# Altium footprint library PCI_Express_M.2_Specification.PcbLib: 9 footprints
Each footprint in its own frame and in the unit in brackets; x right, y up, seen from the top. Pads: shape width x height; smd on the part's side, far side on the other; paste and mask are expansions set on the pad; w line width, h text height; cw(c..) or ccw(c..) is an arc to the next point about the centre after c.
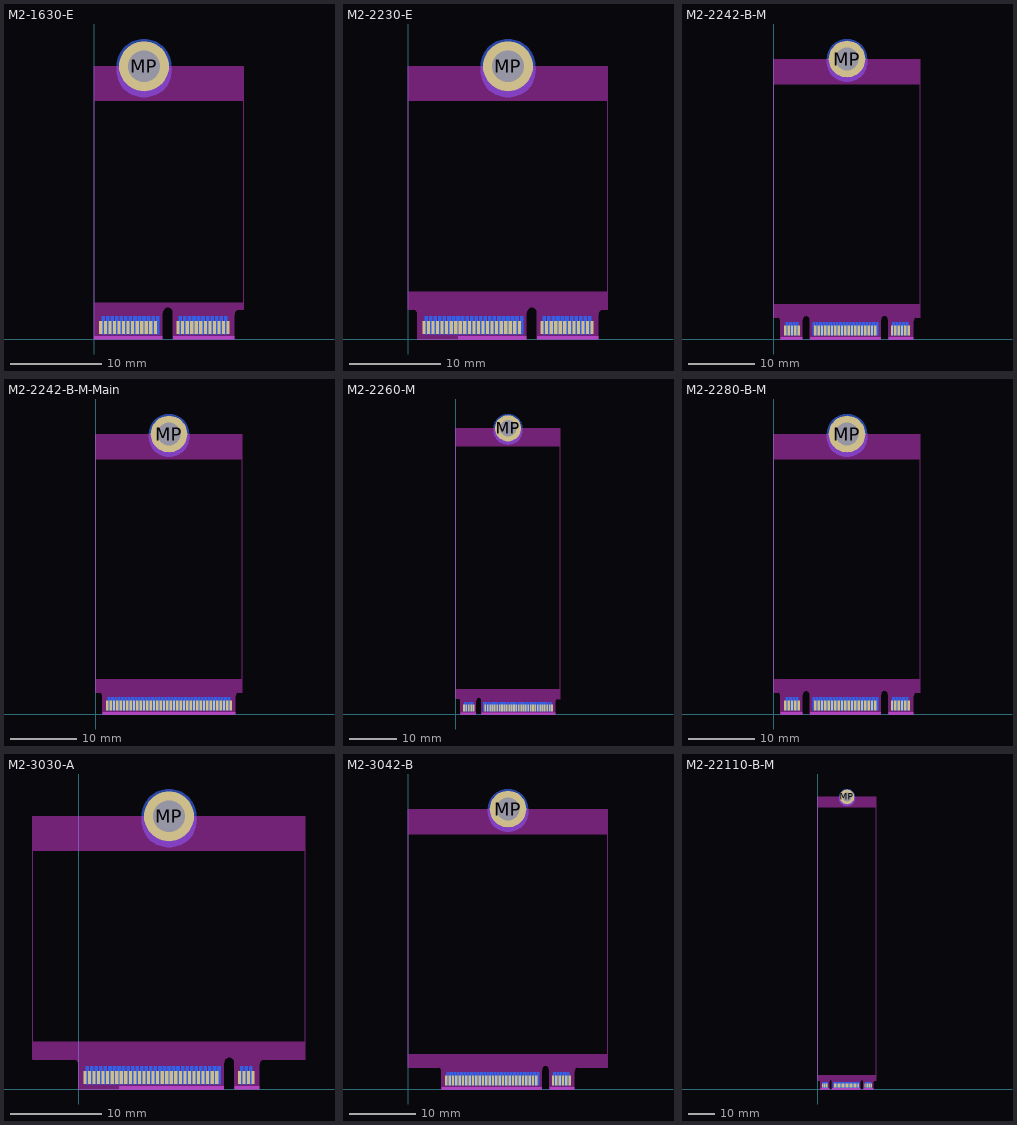
[diagram p0: the footprints below, top view; thin cyan lines are the x and y axes]

## M2-1630-E [mm] "M.2 1630 type E"
height 3
pads (50):
  rect 0.35x1.45 smd: 1(14.75,1.275) 3(14.25,1.275) 5(13.75,1.275) 7(13.25,1.275) 9(12.75,1.275) 11(12.25,1.275) 13(11.75,1.275) 15(11.25,1.275) 17(10.75,1.275) 19(10.25,1.275) 21(9.75,1.275) 23(9.25,1.275) 33(6.75,1.275) 35(6.25,1.275) 37(5.75,1.275) 39(5.25,1.275) 41(4.75,1.275) 43(4.25,1.275) 45(3.75,1.275) 47(3.25,1.275) 49(2.75,1.275) 51(2.25,1.275) 53(1.75,1.275) 55(1.25,1.275) 57(0.75,1.275)
  rect 0.35x1.95 smd far side: 2(14.5,1.525) 4(14,1.525) 6(13.5,1.525) 8(13,1.525) 10(12.5,1.525) 12(12,1.525) 14(11.5,1.525) 16(11,1.525) 18(10.5,1.525) 20(10,1.525) 22(9.5,1.525) 32(7,1.525) 34(6.5,1.525) 36(6,1.525) 38(5.5,1.525) 40(5,1.525) 42(4.5,1.525) 44(4,1.525) 46(3.5,1.525) 48(3,1.525) 50(2.5,1.525) 52(2,1.525) 54(1.5,1.525) 56(1,1.525)
  round 5.5 / inner round 5.5 / far side round 3.525 hole 3.5: MP(5.5,30)
Top Layer:
  text "E" at 9.052,3.025 h0.35
Bottom Layer:
  region: 7.788,27.548 7.714,27.473 7.554,27.333 7.386,27.204 7.21,27.087 7.026,26.981 6.836,26.887 6.641,26.806 6.44,26.738 6.235,26.683 6.027,26.642 5.817,26.614 5.606,26.6 5.5,26.6 5.395,26.6 5.185,26.615 4.977,26.643 4.771,26.685 4.568,26.74 4.369,26.808 4.175,26.889 3.987,26.983 3.805,27.088 3.631,27.206 3.464,27.334 3.307,27.473 3.233,27.548 3.163,27.633 3.036,27.811 2.921,27.997 2.818,28.191 2.728,28.39 2.651,28.595 2.588,28.805 2.538,29.019 2.503,29.235 2.482,29.453 2.475,29.672 2.483,29.891 2.494,30 2.494,30.118 2.512,30.354 2.549,30.587 2.604,30.817 2.677,31.041 2.768,31.26 2.875,31.47 2.998,31.671 3.137,31.863 3.291,32.042 3.458,32.209 3.637,32.363 3.829,32.502 4.03,32.625 4.24,32.732 4.459,32.823 4.683,32.896 4.913,32.951 5.146,32.988 5.382,33.006 5.5,33.006 5.618,33.006 5.854,32.988 6.087,32.951 6.317,32.896 6.541,32.823 6.76,32.732 6.97,32.625 7.171,32.501 7.363,32.363 7.542,32.209 7.709,32.042 7.863,31.863 8.001,31.671 8.125,31.47 8.232,31.26 8.323,31.041 8.396,30.817 8.451,30.587 8.488,30.354 8.506,30.118 8.506,30 8.518,29.891 8.527,29.673 8.522,29.454 8.503,29.237 8.469,29.021 8.422,28.807 8.361,28.598 8.286,28.392 8.197,28.192 8.096,27.999 7.983,27.812 7.857,27.633
Top Solder:
  region: 8.725,0 8.725,2 15.425,2 15.425,0
  region: 0,0 0,2 7.525,2 7.525,0
  text "E" at 9.052,3.025 h0.35
Bottom Solder:
  region: 8.725,0 8.725,2.5 15.425,2.5 15.425,0
  region: 0,0 0,2.5 7.525,2.5 7.525,0
Keep-Out Layer:
  region: 16.5,4 0,4 0,0 7.525,0 7.525,2.9 7.537,3.017 7.626,3.233 7.792,3.399 8.008,3.488 8.125,3.5 8.242,3.488 8.458,3.399 8.624,3.233 8.713,3.017 8.725,2.9 8.725,0 15.425,0 15.425,2.75 15.435,2.848 15.509,3.028 15.647,3.166 15.827,3.24 15.925,3.25 16.5,3.25
  region: 0,30 0,26.2 16.5,26.2 16.5,30
  lines w0.1: 0,0 7.525,0 7.525,2.9 cw(c8.125,2.9) 8.725,2.9 8.725,0 15.425,0 15.425,2.75 cw(c15.925,2.75) 15.925,3.25 16.5,3.25 16.5,30 0,30 0,0
Mechanical 1:
  text "AREA RESERVED FOR RF RECEPTACLES OR COMPONENTS WHEN NO RF RECEPTACLES USED" at 8.753,26.615 h0.35
  text "Bottom Side Component Zone Limit" at 0.147,2.526 h0.35
Card Edge Bevel:
  region: 0,0.3 0,0 7.525,0 7.525,0.3
  region: 8.725,0.3 8.725,0 15.425,0 15.425,0.3

## M2-2230-E [mm] "M.2 2230 type E"
height 3
pads (68):
  rect 0.35x1.45 smd: 1(20.25,1.275) 3(19.75,1.275) 5(19.25,1.275) 7(18.75,1.275) 9(18.25,1.275) 11(17.75,1.275) 13(17.25,1.275) 15(16.75,1.275) 17(16.25,1.275) 19(15.75,1.275) 21(15.25,1.275) 23(14.75,1.275) 33(12.25,1.275) 35(11.75,1.275) 37(11.25,1.275) 39(10.75,1.275) 41(10.25,1.275) 43(9.75,1.275) 45(9.25,1.275) 47(8.75,1.275) 49(8.25,1.275) 51(7.75,1.275) 53(7.25,1.275) 55(6.75,1.275) 57(6.25,1.275) 59(5.75,1.275) 61(5.25,1.275) 63(4.75,1.275) 65(4.25,1.275) 67(3.75,1.275) 69(3.25,1.275) 71(2.75,1.275) 73(2.25,1.275) 75(1.75,1.275)
  rect 0.35x1.95 smd far side: 2(20,1.525) 4(19.5,1.525) 6(19,1.525) 8(18.5,1.525) 10(18,1.525) 12(17.5,1.525) 14(17,1.525) 16(16.5,1.525) 18(16,1.525) 20(15.5,1.525) 22(15,1.525) 32(12.5,1.525) 34(12,1.525) 36(11.5,1.525) 38(11,1.525) 40(10.5,1.525) 42(10,1.525) 44(9.5,1.525) 46(9,1.525) 48(8.5,1.525) 50(8,1.525) 52(7.5,1.525) 54(7,1.525) 56(6.5,1.525) 58(6,1.525) 60(5.5,1.525) 62(5,1.525) 64(4.5,1.525) 66(4,1.525) 68(3.5,1.525) 70(3,1.525) 72(2.5,1.525) 74(2,1.525)
  round 5.5 / inner round 5.5 / far side round 3.525 hole 3.5: MP(11,30)
Top Layer:
  text "E" at 14.552,3.025 h0.35
Bottom Layer:
  region: 13.288,27.548 13.214,27.473 13.054,27.333 12.886,27.204 12.71,27.087 12.526,26.981 12.336,26.887 12.141,26.806 11.94,26.738 11.735,26.683 11.527,26.642 11.317,26.614 11.106,26.6 11,26.6 10.895,26.6 10.685,26.615 10.477,26.643 10.271,26.685 10.068,26.74 9.869,26.808 9.675,26.889 9.487,26.983 9.305,27.088 9.131,27.206 8.964,27.334 8.807,27.473 8.733,27.548 8.663,27.633 8.536,27.811 8.421,27.997 8.318,28.191 8.228,28.39 8.151,28.595 8.088,28.805 8.038,29.019 8.003,29.235 7.982,29.453 7.975,29.672 7.983,29.891 7.994,30 7.994,30.118 8.012,30.354 8.049,30.587 8.104,30.817 8.177,31.041 8.268,31.26 8.375,31.47 8.498,31.671 8.637,31.863 8.791,32.042 8.958,32.209 9.137,32.363 9.329,32.502 9.53,32.625 9.74,32.732 9.959,32.823 10.183,32.896 10.413,32.951 10.646,32.988 10.882,33.006 11,33.006 11.118,33.006 11.354,32.988 11.587,32.951 11.817,32.896 12.041,32.823 12.26,32.732 12.47,32.625 12.671,32.501 12.863,32.363 13.042,32.209 13.209,32.042 13.363,31.863 13.501,31.671 13.625,31.47 13.732,31.26 13.823,31.041 13.896,30.817 13.951,30.587 13.988,30.354 14.006,30.118 14.006,30 14.018,29.891 14.027,29.673 14.022,29.454 14.003,29.237 13.969,29.021 13.922,28.807 13.861,28.598 13.786,28.392 13.697,28.192 13.596,27.999 13.483,27.812 13.357,27.633
Top Solder:
  region: 14.225,0 14.225,2 20.925,2 20.925,0
  region: 1.064,0 1.064,2 13.025,2 13.025,0
  text "E" at 14.552,3.025 h0.35
Bottom Solder:
  region: 14.225,0 14.225,2.5 20.925,2.5 20.925,0
  region: 1.064,0 1.064,2.5 13.025,2.5 13.025,0
Keep-Out Layer:
  region: 22,5.2 0,5.2 0,3.263 0.593,3.263 0.64,3.259 0.732,3.239 0.82,3.204 0.9,3.154 0.936,3.124 0.968,3.089 1.02,3.009 1.056,2.921 1.073,2.828 1.075,2.781 1.075,0 13.025,0 13.025,2.9 13.037,3.017 13.126,3.233 13.292,3.399 13.508,3.488 13.625,3.5 13.742,3.488 13.958,3.399 14.124,3.233 14.213,3.017 14.225,2.9 14.225,0 20.925,0 20.925,2.75 20.935,2.848 21.009,3.028 21.147,3.166 21.327,3.24 21.425,3.25 22,3.25
  region: 0,30 0,26.2 22,26.2 22,30
  lines w0.1: 0,3.263 0.593,3.263 cw(c0.593,2.781) 1.075,2.781 1.075,0 13.025,0 13.025,2.9 cw(c13.625,2.9) 14.225,2.9 14.225,0 20.925,0 20.925,2.75 cw(c21.425,2.75) 21.425,3.25 22,3.25 22,30 16.5,30 0,30 0,3.263
Mechanical 1:
  text "AREA RESERVED FOR RF RECEPTACLES OR COMPONENTS WHEN NO RF RECEPTACLES USED" at 14.253,26.615 h0.35
  text "Bottom Side Component Zone Limit" at 1.853,3.27 h0.35
Card Edge Bevel:
  region: 5.5,0.3 5.5,0 13.025,0 13.025,0.3
  region: 14.225,0.3 14.225,0 20.925,0 20.925,0.3

## M2-2242-B-M [mm] "M.2 2242 type B M"
height 3
pads (60):
  rect 0.35x1.45 smd: 1(20.25,1.275) 3(19.75,1.275) 5(19.25,1.275) 7(18.75,1.275) 9(18.25,1.275) 11(17.75,1.275) 21(15.25,1.275) 23(14.75,1.275) 25(14.25,1.275) 27(13.75,1.275) 29(13.25,1.275) 31(12.75,1.275) 33(12.25,1.275) 35(11.75,1.275) 37(11.25,1.275) 39(10.75,1.275) 41(10.25,1.275) 43(9.75,1.275) 45(9.25,1.275) 47(8.75,1.275) 49(8.25,1.275) 51(7.75,1.275) 53(7.25,1.275) 55(6.75,1.275) 57(6.25,1.275) 67(3.75,1.275) 69(3.25,1.275) 71(2.75,1.275) 73(2.25,1.275) 75(1.75,1.275)
  rect 0.35x1.95 smd far side: 2(20,1.525) 4(19.5,1.525) 6(19,1.525) 8(18.5,1.525) 10(18,1.525) 20(15.5,1.525) 22(15,1.525) 24(14.5,1.525) 26(14,1.525) 28(13.5,1.525) 30(13,1.525) 32(12.5,1.525) 34(12,1.525) 36(11.5,1.525) 38(11,1.525) 40(10.5,1.525) 42(10,1.525) 44(9.5,1.525) 46(9,1.525) 48(8.5,1.525) 50(8,1.525) 52(7.5,1.525) 54(7,1.525) 56(6.5,1.525) 58(6,1.525) 68(3.5,1.525) 70(3,1.525) 72(2.5,1.525) 74(2,1.525)
  round 5.5 / inner round 5.5 / far side round 3.525 hole 3.5: MP(11,41.997)
Top Layer:
  text "B" at 17.602,3.025 h0.35
  text "M" at 5.952,3.025 h0.35
Bottom Layer:
  region: 13.288,39.545 13.214,39.47 13.054,39.33 12.886,39.201 12.71,39.083 12.526,38.977 12.336,38.884 12.141,38.803 11.94,38.735 11.735,38.68 11.527,38.638 11.317,38.611 11.106,38.597 11,38.597 10.895,38.597 10.685,38.612 10.477,38.64 10.271,38.681 10.068,38.737 9.869,38.805 9.675,38.886 9.487,38.979 9.305,39.085 9.131,39.203 8.964,39.331 8.807,39.47 8.733,39.545 8.663,39.63 8.536,39.808 8.421,39.994 8.318,40.187 8.228,40.387 8.151,40.592 8.088,40.802 8.038,41.015 8.003,41.232 7.982,41.45 7.975,41.669 7.983,41.888 7.994,41.997 7.994,42.115 8.012,42.35 8.049,42.584 8.104,42.814 8.177,43.038 8.268,43.256 8.375,43.467 8.498,43.668 8.637,43.859 8.791,44.039 8.958,44.206 9.137,44.36 9.329,44.498 9.53,44.622 9.74,44.729 9.959,44.819 10.183,44.892 10.413,44.948 10.646,44.985 10.882,45.003 11,45.003 11.118,45.003 11.354,44.985 11.587,44.948 11.817,44.892 12.041,44.819 12.26,44.729 12.47,44.622 12.671,44.498 12.863,44.36 13.042,44.206 13.209,44.039 13.363,43.859 13.501,43.668 13.625,43.467 13.732,43.256 13.823,43.038 13.896,42.814 13.951,42.584 13.988,42.35 14.006,42.115 14.006,41.997 14.018,41.888 14.027,41.67 14.022,41.451 14.003,41.234 13.969,41.018 13.922,40.804 13.861,40.595 13.786,40.389 13.697,40.189 13.596,39.996 13.483,39.809 13.357,39.63
Top Solder:
  region: 5.476,0 5.476,2 16.026,2 16.026,0
  region: 1.064,0 1.064,2 4.276,2 4.276,0
  region: 17.226,0 17.226,2 20.925,2 20.925,0
  text "M" at 5.952,3.025 h0.35
  text "B" at 17.602,3.025 h0.35
Bottom Solder:
  region: 5.476,0 5.476,2.5 16.026,2.5 16.026,0
  region: 1.064,0 1.064,2.5 4.276,2.5 4.276,0
  region: 17.226,0 17.226,2.5 20.925,2.5 20.925,0
Keep-Out Layer:
  region: 0,42 0,38.2 22,38.2 22,42
  region: 22,5.2 22,3.25 21.425,3.25 21.327,3.24 21.147,3.166 21.009,3.028 20.935,2.848 20.925,2.75 20.925,0 17.226,0 17.226,2.9 17.215,3.017 17.125,3.233 16.96,3.399 16.743,3.488 16.626,3.5 16.509,3.488 16.293,3.399 16.127,3.233 16.038,3.017 16.026,2.9 16.026,0 5.476,0 5.476,2.9 5.465,3.017 5.375,3.233 5.21,3.399 4.993,3.488 4.876,3.5 4.759,3.488 4.543,3.399 4.377,3.233 4.288,3.017 4.276,2.9 4.276,0 1.075,0 1.075,2.781 1.066,2.875 0.994,3.049 0.861,3.182 0.687,3.254 0.593,3.263 0,3.263 0,5.2
  lines w0.1: 20.925,0 20.925,0 ; 20.925,0 17.226,0 17.226,2.9 ccw(c16.626,2.9) 16.026,2.9 16.026,0 5.476,0 5.476,2.9 ccw(c4.876,2.9) 4.276,2.9 4.276,0 1.075,0 1.075,2.781 ccw(c0.593,2.781) 0.593,3.263 0,3.263 0,42 22,42 22,3.25 21.425,3.25 ccw(c21.425,2.75) 20.925,2.75 20.925,0
Mechanical 1:
  text "Bottom Side Component Zone Limit" at 1.849,3.517 h0.35
  text "AREA RESERVED FOR RF RECEPTACLES OR COMPONENTS WHEN NO RF RECEPTACLES USED" at 14.253,38.515 h0.35
Card Edge Bevel:
  region: 17.226,0.3 17.226,0 20.925,0 20.925,0.3
  region: 5.476,0.3 5.476,0 16.026,0 16.026,0.3
  region: 1.075,0.3 1.075,0 4.276,0 4.276,0.3

## M2-2242-B-M-Main [mm] "M.2 2242 type B M"
height 3
pads (76):
  rect 0.35x1.45 smd: 1(20.25,1.275) 3(19.75,1.275) 5(19.25,1.275) 7(18.75,1.275) 9(18.25,1.275) 11(17.75,1.275) 13(17.25,1.275) 15(16.75,1.275) 17(16.25,1.275) 19(15.75,1.275) 21(15.25,1.275) 23(14.75,1.275) 25(14.25,1.275) 27(13.75,1.275) 29(13.25,1.275) 31(12.75,1.275) 33(12.25,1.275) 35(11.75,1.275) 37(11.25,1.275) 39(10.75,1.275) 41(10.25,1.275) 43(9.75,1.275) 45(9.25,1.275) 47(8.75,1.275) 49(8.25,1.275) 51(7.75,1.275) 53(7.25,1.275) 55(6.75,1.275) 57(6.25,1.275) 59(5.75,1.275) 61(5.25,1.275) 63(4.75,1.275) 65(4.25,1.275) 67(3.75,1.275) 69(3.25,1.275) 71(2.75,1.275) 73(2.25,1.275) 75(1.75,1.275)
  rect 0.35x1.95 smd far side: 2(20,1.525) 4(19.5,1.525) 6(19,1.525) 8(18.5,1.525) 10(18,1.525) 12(17.5,1.525) 14(17,1.525) 16(16.5,1.525) 18(16,1.525) 20(15.5,1.525) 22(15,1.525) 24(14.5,1.525) 26(14,1.525) 28(13.5,1.525) 30(13,1.525) 32(12.5,1.525) 34(12,1.525) 36(11.5,1.525) 38(11,1.525) 40(10.5,1.525) 42(10,1.525) 44(9.5,1.525) 46(9,1.525) 48(8.5,1.525) 50(8,1.525) 52(7.5,1.525) 54(7,1.525) 56(6.5,1.525) 58(6,1.525) 60(5.5,1.525) 62(5,1.525) 64(4.5,1.525) 66(4,1.525) 68(3.5,1.525) 70(3,1.525) 72(2.5,1.525) 74(2,1.525)
  round 5.5 / inner round 5.5 / far side round 3.525 hole 3.5: MP(11,41.997)
Top Layer:
  text "Edit_Key_Number" at 16.19,3.983 h0.35
Bottom Layer:
  region: 13.288,39.545 13.214,39.47 13.054,39.33 12.886,39.201 12.71,39.083 12.526,38.977 12.336,38.884 12.141,38.803 11.94,38.735 11.735,38.68 11.527,38.638 11.317,38.611 11.106,38.597 11,38.597 10.895,38.597 10.685,38.612 10.477,38.64 10.271,38.681 10.068,38.737 9.869,38.805 9.675,38.886 9.487,38.979 9.305,39.085 9.131,39.203 8.964,39.331 8.807,39.47 8.733,39.545 8.663,39.63 8.536,39.808 8.421,39.994 8.318,40.187 8.228,40.387 8.151,40.592 8.088,40.802 8.038,41.015 8.003,41.232 7.982,41.45 7.975,41.669 7.983,41.888 7.994,41.997 7.994,42.115 8.012,42.35 8.049,42.584 8.104,42.814 8.177,43.038 8.268,43.256 8.375,43.467 8.498,43.668 8.637,43.859 8.791,44.039 8.958,44.206 9.137,44.36 9.329,44.498 9.53,44.622 9.74,44.729 9.959,44.819 10.183,44.892 10.413,44.948 10.646,44.985 10.882,45.003 11,45.003 11.118,45.003 11.354,44.985 11.587,44.948 11.817,44.892 12.041,44.819 12.26,44.729 12.47,44.622 12.671,44.498 12.863,44.36 13.042,44.206 13.209,44.039 13.363,43.859 13.501,43.668 13.625,43.467 13.732,43.256 13.823,43.038 13.896,42.814 13.951,42.584 13.988,42.35 14.006,42.115 14.006,41.997 14.018,41.888 14.027,41.67 14.022,41.451 14.003,41.234 13.969,41.018 13.922,40.804 13.861,40.595 13.786,40.389 13.697,40.189 13.596,39.996 13.483,39.809 13.357,39.63
Top Solder:
  region: 1.064,0 1.064,2 20.925,2 20.925,0
  text "Edit_Key_Number" at 16.19,3.983 h0.35
Bottom Solder:
  region: 1.064,0 1.064,2.5 20.925,2.5 20.925,0
Keep-Out Layer:
  region: 22,5.2 22,3.25 21.425,3.25 21.327,3.24 21.147,3.166 21.009,3.028 20.935,2.848 20.925,2.75 20.925,0 1.075,0 1.075,2.781 1.066,2.875 0.994,3.049 0.861,3.182 0.687,3.254 0.593,3.263 0,3.263 0,5.2
  region: 0,42 0,38.2 22,38.2 22,42
  lines w0.1: 20.925,0 1.075,0 1.075,2.781 ccw(c0.593,2.781) 0.593,3.263 0,3.263 0,42 22,42 22,3.25 21.425,3.25 ccw(c21.425,2.75) 20.925,2.75 20.925,0 ; 20.925,0 20.925,0
Mechanical 1:
  text "AREA RESERVED FOR RF RECEPTACLES OR COMPONENTS WHEN NO RF RECEPTACLES USED" at 14.253,38.515 h0.35
  text "Bottom Side Component Zone Limit" at 7.353,3.517 h0.35
Card Edge Bevel:
  region: 1.075,0.3 1.075,0 20.925,0 20.925,0.3

## M2-2260-M [mm] "M.2 2260 type M"
height 3
pads (68):
  rect 0.35x1.45 smd: 1(20.25,1.275) 3(19.75,1.275) 5(19.25,1.275) 7(18.75,1.275) 9(18.25,1.275) 11(17.75,1.275) 13(17.25,1.275) 15(16.75,1.275) 17(16.25,1.275) 19(15.75,1.275) 21(15.25,1.275) 23(14.75,1.275) 25(14.25,1.275) 27(13.75,1.275) 29(13.25,1.275) 31(12.75,1.275) 33(12.25,1.275) 35(11.75,1.275) 37(11.25,1.275) 39(10.75,1.275) 41(10.25,1.275) 43(9.75,1.275) 45(9.25,1.275) 47(8.75,1.275) 49(8.25,1.275) 51(7.75,1.275) 53(7.25,1.275) 55(6.75,1.275) 57(6.25,1.275) 67(3.75,1.275) 69(3.25,1.275) 71(2.75,1.275) 73(2.25,1.275) 75(1.75,1.275)
  rect 0.35x1.95 smd far side: 2(20,1.525) 4(19.5,1.525) 6(19,1.525) 8(18.5,1.525) 10(18,1.525) 12(17.5,1.525) 14(17,1.525) 16(16.5,1.525) 18(16,1.525) 20(15.5,1.525) 22(15,1.525) 24(14.5,1.525) 26(14,1.525) 28(13.5,1.525) 30(13,1.525) 32(12.5,1.525) 34(12,1.525) 36(11.5,1.525) 38(11,1.525) 40(10.5,1.525) 42(10,1.525) 44(9.5,1.525) 46(9,1.525) 48(8.5,1.525) 50(8,1.525) 52(7.5,1.525) 54(7,1.525) 56(6.5,1.525) 58(6,1.525) 68(3.5,1.525) 70(3,1.525) 72(2.5,1.525) 74(2,1.525)
  round 5.5 / inner round 5.5 / far side round 3.525 hole 3.5: MP(11,60)
Top Layer:
  text "M" at 5.952,3.025 h0.35
Bottom Layer:
  region: 13.288,57.548 13.214,57.473 13.054,57.333 12.886,57.204 12.71,57.087 12.526,56.981 12.336,56.887 12.141,56.806 11.94,56.738 11.735,56.683 11.527,56.642 11.317,56.614 11.106,56.6 11,56.6 10.895,56.6 10.685,56.615 10.477,56.643 10.271,56.685 10.068,56.74 9.869,56.808 9.675,56.889 9.487,56.983 9.305,57.088 9.131,57.206 8.964,57.334 8.807,57.473 8.733,57.548 8.663,57.633 8.536,57.811 8.421,57.997 8.318,58.191 8.228,58.39 8.151,58.595 8.088,58.805 8.038,59.019 8.003,59.235 7.982,59.453 7.975,59.672 7.983,59.891 7.994,60 7.994,60.118 8.012,60.354 8.049,60.587 8.104,60.817 8.177,61.041 8.268,61.26 8.375,61.47 8.498,61.671 8.637,61.863 8.791,62.042 8.958,62.209 9.137,62.363 9.329,62.502 9.53,62.625 9.74,62.732 9.959,62.823 10.183,62.896 10.413,62.951 10.646,62.988 10.882,63.006 11,63.006 11.118,63.006 11.354,62.988 11.587,62.951 11.817,62.896 12.041,62.823 12.26,62.732 12.47,62.625 12.671,62.501 12.863,62.363 13.042,62.209 13.209,62.042 13.363,61.863 13.501,61.671 13.625,61.47 13.732,61.26 13.823,61.041 13.896,60.817 13.951,60.587 13.988,60.354 14.006,60.118 14.006,60 14.018,59.891 14.027,59.673 14.022,59.454 14.003,59.237 13.969,59.021 13.922,58.807 13.861,58.598 13.786,58.392 13.697,58.192 13.596,57.999 13.483,57.812 13.357,57.633
Top Solder:
  region: 1.064,0 1.064,2 4.276,2 4.276,0
  region: 5.476,0 5.476,2 20.925,2 20.925,0
  text "M" at 5.952,3.025 h0.35
Bottom Solder:
  region: 1.064,0 1.064,2.5 4.276,2.5 4.276,0
  region: 5.476,0 5.476,2.5 20.925,2.5 20.925,0
Keep-Out Layer:
  region: 22,5.2 22,3.25 21.425,3.25 21.327,3.24 21.147,3.166 21.009,3.028 20.935,2.848 20.925,2.75 20.925,0 5.476,0 5.476,2.9 5.465,3.017 5.375,3.233 5.21,3.399 4.993,3.488 4.876,3.5 4.759,3.488 4.543,3.399 4.377,3.233 4.288,3.017 4.276,2.9 4.276,0 1.075,0 1.075,2.781 1.066,2.875 0.994,3.049 0.861,3.182 0.687,3.254 0.593,3.263 0,3.263 0,5.2
  region: 0,60 0,56.2 22,56.2 22,60
  lines w0.1: 20.925,0 20.925,2.75 cw(c21.425,2.75) 21.425,3.25 22,3.25 22,60 0,60 0,3.263 0.593,3.263 cw(c0.593,2.781) 1.075,2.781 1.075,0 4.276,0 4.276,2.9 cw(c4.876,2.9) 5.476,2.9 5.476,0 20.925,0 ; 20.925,0 20.925,0
Mechanical 1:
  text "AREA RESERVED FOR RF RECEPTACLES OR COMPONENTS WHEN NO RF RECEPTACLES USED" at 14.253,56.515 h0.35
  text "Bottom Side Component Zone Limit" at 8.753,3.17 h0.35
Card Edge Bevel:
  region: 1.075,0.3 1.075,0 4.276,0 4.276,0.3
  region: 5.476,0.3 5.476,0 20.925,0 20.925,0.3

## M2-2280-B-M [mm] "M.2 2280 type B M"
height 3
pads (60):
  rect 0.35x1.45 smd: 1(20.25,1.275) 3(19.75,1.275) 5(19.25,1.275) 7(18.75,1.275) 9(18.25,1.275) 11(17.75,1.275) 21(15.25,1.275) 23(14.75,1.275) 25(14.25,1.275) 27(13.75,1.275) 29(13.25,1.275) 31(12.75,1.275) 33(12.25,1.275) 35(11.75,1.275) 37(11.25,1.275) 39(10.75,1.275) 41(10.25,1.275) 43(9.75,1.275) 45(9.25,1.275) 47(8.75,1.275) 49(8.25,1.275) 51(7.75,1.275) 53(7.25,1.275) 55(6.75,1.275) 57(6.25,1.275) 67(3.75,1.275) 69(3.25,1.275) 71(2.75,1.275) 73(2.25,1.275) 75(1.75,1.275)
  rect 0.35x1.95 smd far side: 2(20,1.525) 4(19.5,1.525) 6(19,1.525) 8(18.5,1.525) 10(18,1.525) 20(15.5,1.525) 22(15,1.525) 24(14.5,1.525) 26(14,1.525) 28(13.5,1.525) 30(13,1.525) 32(12.5,1.525) 34(12,1.525) 36(11.5,1.525) 38(11,1.525) 40(10.5,1.525) 42(10,1.525) 44(9.5,1.525) 46(9,1.525) 48(8.5,1.525) 50(8,1.525) 52(7.5,1.525) 54(7,1.525) 56(6.5,1.525) 58(6,1.525) 68(3.5,1.525) 70(3,1.525) 72(2.5,1.525) 74(2,1.525)
  round 5.5 / inner round 5.5 / far side round 3.525 hole 3.5: MP(11,41.997)
Top Layer:
  text "M" at 5.952,3.025 h0.35
  text "B" at 17.602,3.025 h0.35
Bottom Layer:
  region: 13.288,39.545 13.214,39.47 13.054,39.33 12.886,39.201 12.71,39.083 12.526,38.977 12.336,38.884 12.141,38.803 11.94,38.735 11.735,38.68 11.527,38.638 11.317,38.611 11.106,38.597 11,38.597 10.895,38.597 10.685,38.612 10.477,38.64 10.271,38.681 10.068,38.737 9.869,38.805 9.675,38.886 9.487,38.979 9.305,39.085 9.131,39.203 8.964,39.331 8.807,39.47 8.733,39.545 8.663,39.63 8.536,39.808 8.421,39.994 8.318,40.187 8.228,40.387 8.151,40.592 8.088,40.802 8.038,41.015 8.003,41.232 7.982,41.45 7.975,41.669 7.983,41.888 7.994,41.997 7.994,42.115 8.012,42.35 8.049,42.584 8.104,42.814 8.177,43.038 8.268,43.256 8.375,43.467 8.498,43.668 8.637,43.859 8.791,44.039 8.958,44.206 9.137,44.36 9.329,44.498 9.53,44.622 9.74,44.729 9.959,44.819 10.183,44.892 10.413,44.948 10.646,44.985 10.882,45.003 11,45.003 11.118,45.003 11.354,44.985 11.587,44.948 11.817,44.892 12.041,44.819 12.26,44.729 12.47,44.622 12.671,44.498 12.863,44.36 13.042,44.206 13.209,44.039 13.363,43.859 13.501,43.668 13.625,43.467 13.732,43.256 13.823,43.038 13.896,42.814 13.951,42.584 13.988,42.35 14.006,42.115 14.006,41.997 14.018,41.888 14.027,41.67 14.022,41.451 14.003,41.234 13.969,41.018 13.922,40.804 13.861,40.595 13.786,40.389 13.697,40.189 13.596,39.996 13.483,39.809 13.357,39.63
Top Solder:
  region: 17.226,0 17.226,2 20.925,2 20.925,0
  region: 1.064,0 1.064,2 4.276,2 4.276,0
  region: 5.476,0 5.476,2 16.026,2 16.026,0
  text "B" at 17.602,3.025 h0.35
  text "M" at 5.952,3.025 h0.35
Bottom Solder:
  region: 17.226,0 17.226,2.5 20.925,2.5 20.925,0
  region: 1.064,0 1.064,2.5 4.276,2.5 4.276,0
  region: 5.476,0 5.476,2.5 16.026,2.5 16.026,0
Keep-Out Layer:
  region: 22,5.2 22,3.25 21.425,3.25 21.327,3.24 21.147,3.166 21.009,3.028 20.935,2.848 20.925,2.75 20.925,0 17.226,0 17.226,2.9 17.215,3.017 17.125,3.233 16.96,3.399 16.743,3.488 16.626,3.5 16.509,3.488 16.293,3.399 16.127,3.233 16.038,3.017 16.026,2.9 16.026,0 5.476,0 5.476,2.9 5.465,3.017 5.375,3.233 5.21,3.399 4.993,3.488 4.876,3.5 4.759,3.488 4.543,3.399 4.377,3.233 4.288,3.017 4.276,2.9 4.276,0 1.075,0 1.075,2.781 1.066,2.875 0.994,3.049 0.861,3.182 0.687,3.254 0.593,3.263 0,3.263 0,5.2
  region: 0,42 0,38.2 22,38.2 22,42
  lines w0.1: 20.925,0 20.925,2.75 cw(c21.425,2.75) 21.425,3.25 22,3.25 22,42 0,42 0,3.263 0.593,3.263 cw(c0.593,2.781) 1.075,2.781 1.075,0 4.276,0 4.276,2.9 cw(c4.876,2.9) 5.476,2.9 5.476,0 16.026,0 16.026,2.9 cw(c16.626,2.9) 17.226,2.9 17.226,0 20.925,0 ; 20.925,0 20.925,0
Mechanical 1:
  text "AREA RESERVED FOR RF RECEPTACLES OR COMPONENTS WHEN NO RF RECEPTACLES USED" at 14.253,38.515 h0.35
  text "Bottom Side Component Zone Limit" at 7.353,3.517 h0.35
Card Edge Bevel:
  region: 1.075,0.3 1.075,0 4.276,0 4.276,0.3
  region: 5.476,0.3 5.476,0 16.026,0 16.026,0.3
  region: 17.226,0.3 17.226,0 20.925,0 20.925,0.3

## M2-3030-A [mm] "M.2 3030 type A"
height 3
pads (68):
  rect 0.35x1.45 smd: 1(19.175,1.275) 3(18.675,1.275) 5(18.175,1.275) 7(17.675,1.275) 17(15.175,1.275) 19(14.675,1.275) 21(14.175,1.275) 23(13.675,1.275) 25(13.175,1.275) 27(12.675,1.275) 29(12.175,1.275) 31(11.675,1.275) 33(11.175,1.275) 35(10.675,1.275) 37(10.175,1.275) 39(9.675,1.275) 41(9.175,1.275) 43(8.675,1.275) 45(8.175,1.275) 47(7.675,1.275) 49(7.175,1.275) 51(6.675,1.275) 53(6.175,1.275) 55(5.675,1.275) 57(5.175,1.275) 59(4.675,1.275) 61(4.175,1.275) 63(3.675,1.275) 65(3.175,1.275) 67(2.675,1.275) 69(2.175,1.275) 71(1.675,1.275) 73(1.175,1.275) 75(0.675,1.275)
  rect 0.35x1.95 smd far side: 2(18.925,1.525) 4(18.425,1.525) 6(17.925,1.525) 16(15.425,1.525) 18(14.925,1.525) 20(14.425,1.525) 22(13.925,1.525) 24(13.425,1.525) 26(12.925,1.525) 28(12.425,1.525) 30(11.925,1.525) 32(11.425,1.525) 34(10.925,1.525) 36(10.425,1.525) 38(9.925,1.525) 40(9.425,1.525) 42(8.925,1.525) 44(8.425,1.525) 46(7.925,1.525) 48(7.425,1.525) 50(6.925,1.525) 52(6.425,1.525) 54(5.925,1.525) 56(5.425,1.525) 58(4.925,1.525) 60(4.425,1.525) 62(3.925,1.525) 64(3.425,1.525) 66(2.925,1.525) 68(2.425,1.525) 70(1.925,1.525) 72(1.425,1.525) 74(0.925,1.525)
  round 5.5 / inner round 5.5 / far side round 3.525 hole 3.5: MP(9.925,30)
Top Layer:
  text "A" at 17.577,3.025 h0.35
Bottom Layer:
  region: 12.213,27.548 12.138,27.473 11.979,27.333 11.811,27.204 11.635,27.087 11.451,26.981 11.261,26.887 11.065,26.806 10.865,26.738 10.66,26.683 10.452,26.642 10.242,26.614 10.031,26.6 9.925,26.6 9.82,26.6 9.61,26.615 9.402,26.643 9.196,26.685 8.993,26.74 8.794,26.808 8.6,26.889 8.412,26.983 8.23,27.088 8.055,27.206 7.889,27.334 7.731,27.473 7.657,27.548 7.588,27.633 7.461,27.811 7.345,27.997 7.243,28.191 7.152,28.39 7.076,28.595 7.013,28.805 6.963,29.019 6.928,29.235 6.907,29.453 6.9,29.672 6.908,29.891 6.919,30 6.919,30.118 6.937,30.354 6.974,30.587 7.029,30.817 7.102,31.041 7.193,31.26 7.3,31.47 7.423,31.671 7.562,31.863 7.716,32.042 7.883,32.209 8.062,32.363 8.253,32.502 8.455,32.625 8.665,32.732 8.883,32.823 9.108,32.896 9.338,32.951 9.571,32.988 9.807,33.006 9.925,33.006 10.043,33.006 10.278,32.988 10.512,32.951 10.741,32.896 10.966,32.823 11.184,32.732 11.395,32.625 11.596,32.501 11.787,32.363 11.967,32.209 12.134,32.042 12.287,31.863 12.426,31.671 12.55,31.47 12.657,31.26 12.747,31.041 12.82,30.817 12.876,30.587 12.913,30.354 12.931,30.118 12.931,30 12.943,29.891 12.952,29.673 12.947,29.454 12.928,29.237 12.894,29.021 12.847,28.807 12.785,28.598 12.71,28.392 12.622,28.192 12.521,27.999 12.407,27.812 12.282,27.633
Top Solder:
  region: 17.151,0 17.151,2 19.85,2 19.85,0
  region: -0.011,0 -0.011,2 15.951,2 15.951,0
  text "A" at 17.577,3.025 h0.35
Bottom Solder:
  region: 17.151,0 17.151,2.5 19.85,2.5 19.85,0
  region: -0.011,0 -0.011,2.5 15.951,2.5 15.951,0
Keep-Out Layer:
  region: -5.075,30 -5.075,26.2 24.925,26.2 24.925,30
  region: 24.925,5.2 24.925,3.25 20.35,3.25 20.252,3.24 20.072,3.166 19.934,3.028 19.859,2.848 19.85,2.75 19.85,0 17.151,0 17.151,2.9 17.14,3.017 17.05,3.233 16.884,3.399 16.668,3.488 16.551,3.5 16.434,3.488 16.218,3.399 16.052,3.233 15.963,3.017 15.951,2.9 15.951,0 0,0 0,2.781 -0.009,2.875 -0.081,3.049 -0.214,3.182 -0.388,3.254 -0.482,3.263 -5.075,3.263 -5.075,5.2
  lines w0.1: 7.925,30 ccw(c9.925,30) 11.925,30 ; -5.075,3.263 -0.482,3.263 cw(c-0.482,2.781) 0,2.781 0,0 15.951,0 15.951,2.9 cw(c16.551,2.9) 17.151,2.9 17.151,0 19.85,0 19.85,2.75 cw(c20.35,2.75) 20.35,3.25 24.925,3.25 24.925,30 -5.075,30 -5.075,3.263
Mechanical 1:
  text "AREA RESERVED FOR RF RECEPTACLES OR COMPONENTS WHEN NO RF RECEPTACLES USED" at 13.178,26.615 h0.35
  text "Bottom Side Component Zone Limit" at 2.265,3.119 h0.35
Card Edge Bevel:
  region: 4.425,0.3 4.425,0 15.951,0 15.951,0.3
  region: 17.151,0.3 17.151,0 19.85,0 19.85,0.3

## M2-3042-B [mm] "M.2 3042 type B"
height 3
pads (68):
  rect 0.35x1.45 smd: 1(24.25,1.275) 3(23.75,1.275) 5(23.25,1.275) 7(22.75,1.275) 9(22.25,1.275) 11(21.75,1.275) 21(19.25,1.275) 23(18.75,1.275) 25(18.25,1.275) 27(17.75,1.275) 29(17.25,1.275) 31(16.75,1.275) 33(16.25,1.275) 35(15.75,1.275) 37(15.25,1.275) 39(14.75,1.275) 41(14.25,1.275) 43(13.75,1.275) 45(13.25,1.275) 47(12.75,1.275) 49(12.25,1.275) 51(11.75,1.275) 53(11.25,1.275) 55(10.75,1.275) 57(10.25,1.275) 59(9.75,1.275) 61(9.25,1.275) 63(8.75,1.275) 65(8.25,1.275) 67(7.75,1.275) 69(7.25,1.275) 71(6.75,1.275) 73(6.25,1.275) 75(5.75,1.275)
  rect 0.35x1.95 smd far side: 2(24,1.525) 4(23.5,1.525) 6(23,1.525) 8(22.5,1.525) 10(22,1.525) 20(19.5,1.525) 22(19,1.525) 24(18.5,1.525) 26(18,1.525) 28(17.5,1.525) 30(17,1.525) 32(16.5,1.525) 34(16,1.525) 36(15.5,1.525) 38(15,1.525) 40(14.5,1.525) 42(14,1.525) 44(13.5,1.525) 46(13,1.525) 48(12.5,1.525) 50(12,1.525) 52(11.5,1.525) 54(11,1.525) 56(10.5,1.525) 58(10,1.525) 60(9.5,1.525) 62(9,1.525) 64(8.5,1.525) 66(8,1.525) 68(7.5,1.525) 70(7,1.525) 72(6.5,1.525) 74(6,1.525)
  round 5.5 / inner round 5.5 / far side round 3.525 hole 3.5: MP(15,41.997)
Top Layer:
  text "B" at 21.602,3.025 h0.35
Bottom Layer:
  region: 17.288,39.545 17.214,39.47 17.054,39.33 16.886,39.201 16.71,39.083 16.526,38.977 16.336,38.884 16.141,38.803 15.94,38.735 15.735,38.68 15.527,38.638 15.317,38.611 15.106,38.597 15,38.597 14.895,38.597 14.685,38.612 14.477,38.64 14.271,38.681 14.068,38.737 13.869,38.805 13.675,38.886 13.487,38.979 13.305,39.085 13.131,39.203 12.964,39.331 12.807,39.47 12.733,39.545 12.663,39.63 12.536,39.808 12.421,39.994 12.318,40.187 12.228,40.387 12.151,40.592 12.088,40.802 12.038,41.015 12.003,41.232 11.982,41.45 11.975,41.669 11.983,41.888 11.994,41.997 11.994,42.115 12.012,42.35 12.049,42.584 12.104,42.814 12.177,43.038 12.268,43.256 12.375,43.467 12.498,43.668 12.637,43.859 12.791,44.039 12.958,44.206 13.137,44.36 13.329,44.498 13.53,44.622 13.74,44.729 13.959,44.819 14.183,44.892 14.413,44.948 14.646,44.985 14.882,45.003 15,45.003 15.118,45.003 15.354,44.985 15.587,44.948 15.817,44.892 16.041,44.819 16.26,44.729 16.47,44.622 16.671,44.498 16.863,44.36 17.042,44.206 17.209,44.039 17.363,43.859 17.501,43.668 17.625,43.467 17.732,43.256 17.823,43.038 17.896,42.814 17.951,42.584 17.988,42.35 18.006,42.115 18.006,41.997 18.018,41.888 18.027,41.67 18.022,41.451 18.003,41.234 17.969,41.018 17.922,40.804 17.861,40.595 17.786,40.389 17.697,40.189 17.596,39.996 17.483,39.809 17.357,39.63
Top Solder:
  region: 21.226,0 21.226,2 24.925,2 24.925,0
  region: 5.075,0 5.075,2 20.026,2 20.026,0
  text "B" at 21.602,3.025 h0.35
Bottom Solder:
  region: 5.075,0 5.075,2.5 20.026,2.5 20.026,0
  region: 21.226,0 21.226,2.5 24.925,2.5 24.925,0
Keep-Out Layer:
  region: 30,5.2 30,3.25 25.425,3.25 25.327,3.24 25.147,3.166 25.009,3.028 24.935,2.848 24.925,2.75 24.925,0 21.226,0 21.226,2.9 21.215,3.017 21.125,3.233 20.96,3.399 20.743,3.488 20.626,3.5 20.509,3.488 20.293,3.399 20.127,3.233 20.038,3.017 20.026,2.9 20.026,0 5.075,0 5.075,2.781 5.066,2.875 4.994,3.049 4.861,3.182 4.687,3.254 4.593,3.263 0,3.263 0,5.2
  region: 0,42 0,38.2 30,38.2 30,42
  lines w0.1: 24.925,0 24.925,0 ; 24.925,0 21.226,0 21.226,2.9 ccw(c20.626,2.9) 20.026,2.9 20.026,0 5.075,0 5.075,2.781 ccw(c4.593,2.781) 4.593,3.263 0,3.263 0,42 30,42 30,3.25 25.425,3.25 ccw(c25.425,2.75) 24.925,2.75 24.925,0
Mechanical 1:
  text "Bottom Side Component Zone Limit" at 8.353,3.27 h0.35
  text "AREA RESERVED FOR RF RECEPTACLES OR COMPONENTS WHEN NO RF RECEPTACLES USED" at 20.353,38.515 h0.35
Card Edge Bevel:
  region: 21.226,0.3 21.226,0 24.925,0 24.925,0.3
  region: 5.075,0.3 5.075,0 20.026,0 20.026,0.3

## M2-22110-B-M [mm] "M.2 22110 type B M"
height 3
pads (60):
  rect 0.35x1.45 smd: 1(20.25,1.275) 3(19.75,1.275) 5(19.25,1.275) 7(18.75,1.275) 9(18.25,1.275) 11(17.75,1.275) 21(15.25,1.275) 23(14.75,1.275) 25(14.25,1.275) 27(13.75,1.275) 29(13.25,1.275) 31(12.75,1.275) 33(12.25,1.275) 35(11.75,1.275) 37(11.25,1.275) 39(10.75,1.275) 41(10.25,1.275) 43(9.75,1.275) 45(9.25,1.275) 47(8.75,1.275) 49(8.25,1.275) 51(7.75,1.275) 53(7.25,1.275) 55(6.75,1.275) 57(6.25,1.275) 67(3.75,1.275) 69(3.25,1.275) 71(2.75,1.275) 73(2.25,1.275) 75(1.75,1.275)
  rect 0.35x1.95 smd far side: 2(20,1.525) 4(19.5,1.525) 6(19,1.525) 8(18.5,1.525) 10(18,1.525) 20(15.5,1.525) 22(15,1.525) 24(14.5,1.525) 26(14,1.525) 28(13.5,1.525) 30(13,1.525) 32(12.5,1.525) 34(12,1.525) 36(11.5,1.525) 38(11,1.525) 40(10.5,1.525) 42(10,1.525) 44(9.5,1.525) 46(9,1.525) 48(8.5,1.525) 50(8,1.525) 52(7.5,1.525) 54(7,1.525) 56(6.5,1.525) 58(6,1.525) 68(3.5,1.525) 70(3,1.525) 72(2.5,1.525) 74(2,1.525)
  round 5.5 / inner round 5.5 / far side round 3.525 hole 3.5: MP(11,110)
Top Layer:
  text "M" at 5.952,3.025 h0.35
  text "B" at 17.602,3.025 h0.35
Bottom Layer:
  region: 13.288,107.548 13.214,107.473 13.054,107.333 12.886,107.204 12.71,107.087 12.526,106.981 12.336,106.887 12.141,106.806 11.94,106.738 11.735,106.683 11.527,106.642 11.317,106.614 11.106,106.6 11,106.6 10.895,106.6 10.685,106.615 10.477,106.643 10.271,106.685 10.068,106.74 9.869,106.808 9.675,106.889 9.487,106.983 9.305,107.088 9.131,107.206 8.964,107.334 8.807,107.473 8.733,107.548 8.663,107.633 8.536,107.811 8.421,107.997 8.318,108.191 8.228,108.39 8.151,108.595 8.088,108.805 8.038,109.019 8.003,109.235 7.982,109.453 7.975,109.672 7.983,109.891 7.994,110 7.994,110.118 8.012,110.354 8.049,110.587 8.104,110.817 8.177,111.041 8.268,111.26 8.375,111.47 8.498,111.671 8.637,111.863 8.791,112.042 8.958,112.209 9.137,112.363 9.329,112.502 9.53,112.625 9.74,112.732 9.959,112.823 10.183,112.896 10.413,112.951 10.646,112.988 10.882,113.006 11,113.006 11.118,113.006 11.354,112.988 11.587,112.951 11.817,112.896 12.041,112.823 12.26,112.732 12.47,112.625 12.671,112.501 12.863,112.363 13.042,112.209 13.209,112.042 13.363,111.863 13.501,111.671 13.625,111.47 13.732,111.26 13.823,111.041 13.896,110.817 13.951,110.587 13.988,110.354 14.006,110.118 14.006,110 14.018,109.891 14.027,109.673 14.022,109.454 14.003,109.237 13.969,109.021 13.922,108.807 13.861,108.598 13.786,108.392 13.697,108.192 13.596,107.999 13.483,107.812 13.357,107.633
Top Solder:
  region: 17.226,0 17.226,2 20.925,2 20.925,0
  region: 1.064,0 1.064,2 4.276,2 4.276,0
  region: 5.476,0 5.476,2 16.026,2 16.026,0
  text "B" at 17.602,3.025 h0.35
  text "M" at 5.952,3.025 h0.35
Bottom Solder:
  region: 17.226,0 17.226,2.5 20.925,2.5 20.925,0
  region: 1.064,0 1.064,2.5 4.276,2.5 4.276,0
  region: 5.476,0 5.476,2.5 16.026,2.5 16.026,0
Keep-Out Layer:
  region: 22,5.2 22,3.25 21.425,3.25 21.327,3.24 21.147,3.166 21.009,3.028 20.935,2.848 20.925,2.75 20.925,0 17.226,0 17.226,2.9 17.215,3.017 17.125,3.233 16.96,3.399 16.743,3.488 16.626,3.5 16.509,3.488 16.293,3.399 16.127,3.233 16.038,3.017 16.026,2.9 16.026,0 5.476,0 5.476,2.9 5.465,3.017 5.375,3.233 5.21,3.399 4.993,3.488 4.876,3.5 4.759,3.488 4.543,3.399 4.377,3.233 4.288,3.017 4.276,2.9 4.276,0 1.075,0 1.075,2.781 1.066,2.875 0.994,3.049 0.861,3.182 0.687,3.254 0.593,3.263 0,3.263 0,5.2
  region: 0,110 0,106.2 22,106.2 22,110
  lines w0.1: 20.925,0 20.925,2.75 cw(c21.425,2.75) 21.425,3.25 22,3.25 22,110 0,110 0,3.263 0.593,3.263 cw(c0.593,2.781) 1.075,2.781 1.075,0 4.276,0 4.276,2.9 cw(c4.876,2.9) 5.476,2.9 5.476,0 16.026,0 16.026,2.9 cw(c16.626,2.9) 17.226,2.9 17.226,0 20.925,0 ; 20.925,0 20.925,0
Mechanical 1:
  text "AREA RESERVED FOR RF RECEPTACLES OR COMPONENTS WHEN NO RF RECEPTACLES USED" at 14.253,106.515 h0.35
  text "Bottom Side Component Zone Limit" at 7.353,3.27 h0.35
Card Edge Bevel:
  region: 1.075,0.3 1.075,0 4.276,0 4.276,0.3
  region: 5.476,0.3 5.476,0 16.026,0 16.026,0.3
  region: 17.226,0.3 17.226,0 20.925,0 20.925,0.3